# Altium schematic symbol library Simulation Parts.SchLib: 11 symbols
Pins are listed as number, name and electrical type; pins without a type are passive.

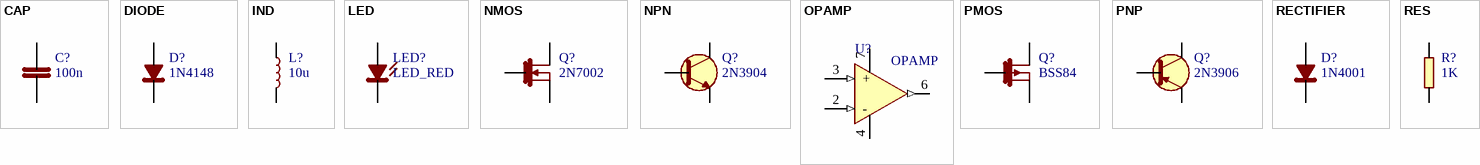
[diagram p0: symbols CAP to RES]

## CAP
designator C?, comment 100n
Capacitor; Value: 100n
simulation model CAP (Capacitor)
pins: 1, 2

## DIODE
designator D?, comment 1N4148
Signal diode
simulation model 1N4148 (Signal diode)
pins: A, K

## IND
designator L?, comment 10u
Inductor; Value: 10u
simulation model INDUCTOR (Inductor)
pins: 1, 2

## LED
designator LED?, comment LED_RED
Light-emitting diode (red)
simulation model LED_RED (Light-emitting diode (red))
pins: A, K

## NMOS
designator Q?, comment 2N7002
N-channel MOSFET
simulation model 2N7002 (N-channel MOSFET)
pins: 1 D, 2 G, 3 S

## NPN
designator Q?, comment 2N3904
NPN bipolar transistor
simulation model 2N3904 (NPN bipolar transistor)
pins: 1 C, 2 B, 3 E

## OPAMP
designator U?
Operational amplifier (generic model)
simulation model OPAMP (Generic operational amplifier)
pins: 2 - (in), 3 + (in), 4 V- (power), 6 OUT (out), 7 V+ (power)

## PMOS
designator Q?, comment BSS84
P-channel MOSFET
simulation model BSS84 (P-channel MOSFET)
pins: 1 D, 2 G, 3 S

## PNP
designator Q?, comment 2N3906
PNP bipolar transistor
simulation model 2N3906 (PNP bipolar transistor)
pins: 1 C, 2 B, 3 E

## RECTIFIER
designator D?, comment 1N4001
Rectifier diode
simulation model 1N4001 (Rectifier diode)
pins: A, K

## RES
designator R?, comment 1K
Resistor; Value: 1K
simulation model RESISTOR (Resistor)
pins: 1, 2